# Altium footprint library Connectors.PcbLib: 305 footprints (part 17 of 20)
Each footprint in its own frame and in the unit in brackets; x right, y up, seen from the top. Pads: shape width x height; smd on the part's side, far side on the other; paste and mask are expansions set on the pad; w line width, h text height; cw(c..) or ccw(c..) is an arc to the next point about the centre after c.
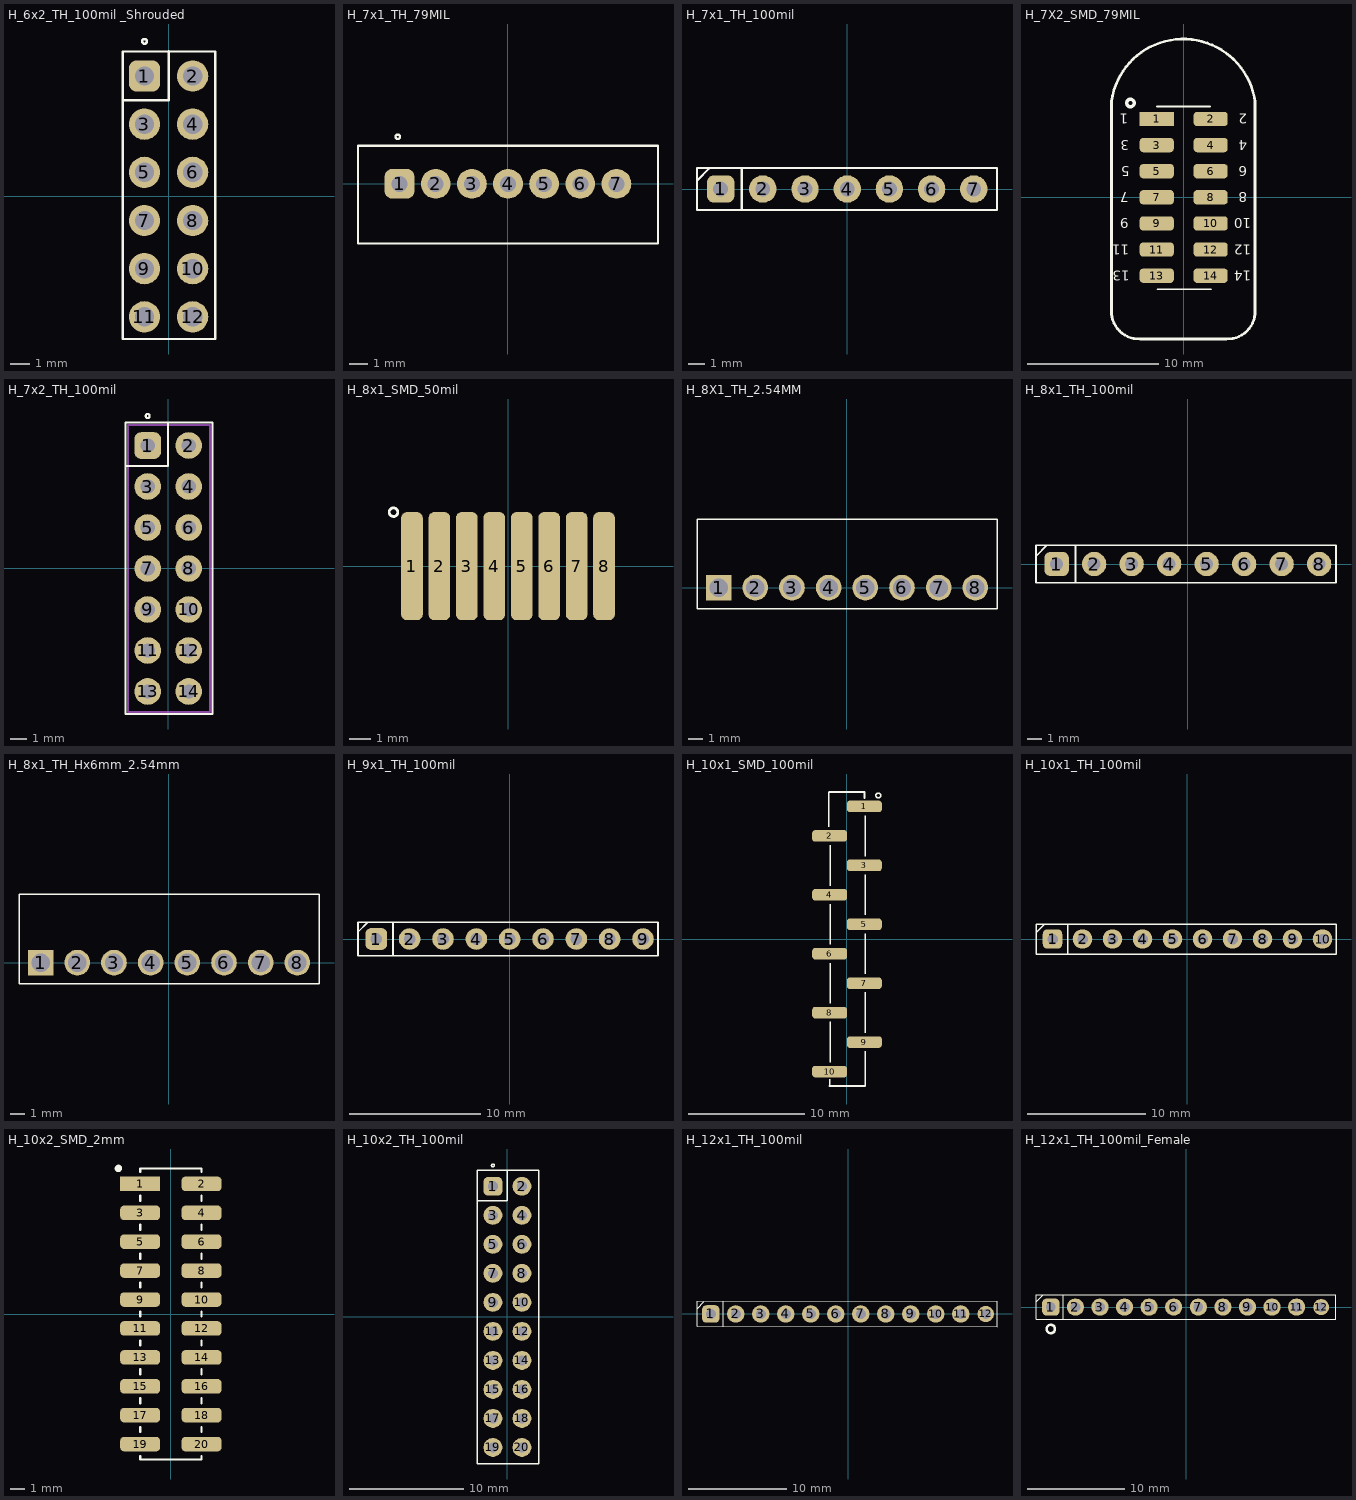
[diagram p16: the footprints below, top view; thin cyan lines are the x and y axes]

## H_6x2_TH_100mil _Shrouded [mil] "/ 20221122 / J.Jaramillo"
pads (12):
  rrect50% 65x65 hole 40: 1(-50,250)
  round 65 hole 40: 2(50,250) 3(-50,150) 4(50,150) 5(-50,50) 6(50,50) 7(-50,-50) 8(50,-50) 9(-50,-150) 10(50,-150) 11(-50,-250) 12(50,-250)
Top Overlay:
  circle w5: c-50,322 r4.92
  lines w5: -95.19,200 0,200 0,301.5 ; -95.19,-296 97,-296 97,301 -95.19,301 -95.19,-296
3D body "connector 12pin.stp": height 362.72, standoff -117.6, extent -60.7,-450.79 472.44,450.79

## H_7x1_TH_79MIL [mil] "/20220804/J-E.Pachon"
pads (7):
  rrect50% 65x65 hole 35: 1(-236.22,0)
  round 65 hole 35: 2(-157.48,0) 3(-78.74,0) 4(0,0) 5(78.74,0) 6(157.48,0) 7(236.22,0)
Top Overlay:
  circle w5: c-240.16,102.36 r4.92
  lines w5: -326.77,-129.92 -326.77,82.68 326.77,82.68 326.77,-129.92 -326.77,-129.92
3D body "62000711622.stp": height 238.19, standoff -135.83, extent -315.51,-116.13 314.41,68.9

## H_7x1_TH_100mil [mil] "/ 20190829 / M-X.Arias"
pads (7):
  rrect50% 65x65 hole 35: 1(-300,0)
  round 65 hole 35: 2(-200,0) 3(-100,0) 4(0,0) 5(100,0) 6(200,0) 7(300,0)
Top Overlay:
  lines w5: -356,19.68 -326.87,48.82 ; -250,-50 -250,50 ; -356,-50 355,-50 355,50 -356,50 -356,-50

## H_7X2_SMD_79MIL [mm] "/20200724/N-A.Potosi"
pads (14):
  rect 2.613x1.1 smd: 1(-2.063,6)
  rrect50% 2.613x1.1 smd: 2(2.063,6) 3(-2.063,4) 4(2.063,4) 5(-2.063,2) 6(2.063,2) 7(-2.063,0) 8(2.063,0) 9(-2.063,-2) 10(2.063,-2) 11(-2.063,-4) 12(2.063,-4) 13(-2.063,-6) 14(2.063,-6)
Top Overlay:
  circle w0.254: c-4.08,7.219 r0.29
  lines w0.127: -2.076,6.952 2.014,6.957 ; -2.003,-7.05 2.087,-7.045
  lines w0.203: -5.524,-8.928 ccw(c-3.425,-8.74) -3.337,-10.845 ; -5.523,-8.95 -5.523,7.4 cw(c-0.039,6.574) 5.457,7.321 ; -3.337,-10.842 3.272,-10.845 ccw(c3.36,-8.74) 5.459,-8.928 ; 5.457,-8.928 5.457,7.4
  text "1" at -4.258,6.381 h0.76
  text "3" at -4.16,4.381 h0.76
  text "2" at 4.856,6.381 h0.76
  text "4" at 4.856,4.381 h0.76
  text "6" at 4.856,2.381 h0.76
  text "8" at 4.856,0.381 h0.76
  text "10" at 5.173,-1.619 h0.76
  text "12" at 5.173,-3.619 h0.76
  text "14" at 5.173,-5.619 h0.76
  text "13" at -4.129,-5.619 h0.76
  text "11" at -4.154,-3.619 h0.76
  text "9" at -4.218,-1.619 h0.76
  text "7" at -4.195,0.381 h0.76
  text "5" at -4.135,2.381 h0.76
3D body "57202g5207lf.stp": height 6.52, standoff 0.02, extent -3.033,-7.045 2.972,6.955

## H_7x2_TH_100mil [mil] "/ 20190614 / J-P.Vargas.A"
pads (14):
  rrect50% 65x65 hole 35: 1(-50,300)
  round 65 hole 35: 2(50,300) 3(-50,200) 4(50,200) 5(-50,100) 6(50,100) 7(-50,0) 8(50,0) 9(-50,-100) 10(50,-100) 11(-50,-200) 12(50,-200) 13(-50,-300) 14(50,-300)
Top Overlay:
  circle w5: c-50,372 r4.92
  lines w5: -104,250 0,250 0,356 ; -104,-355 108,-355 108,356 -104,356 -104,-355
Mechanical 1:
  lines w3.94: -98,-350 102,-350 102,350 -98,350 -98,-350
3D body "m20-9980745_asm.stp": height 340.16, standoff -119.69, extent -98.32,-350 101.68,350

## H_8x1_SMD_50mil [mm] "/ 20190916/ N A potosi"
pads (8):
  rrect50% 1x5 smd: 1(-4.445,0) 2(-3.175,0) 3(-1.905,0) 4(-0.635,0) 5(0.635,0) 6(1.905,0) 7(3.175,0) 8(4.445,0)
Top Overlay:
  circle w0.127: c-5.3,2.5 r0.2

## H_8X1_TH_2.54MM [mil] "/20221011/J-E.Pachon"
pads (8):
  rect 70x70 hole 50: 1(-350,0)
  round 70 hole 50: 2(-250,0) 3(-150,0) 4(-50,0) 5(50,0) 6(150,0) 7(250,0) 8(350,0)
Top Overlay:
  lines w3.94: -408.97,-58.27 -408.97,187.01 409.06,187.01 409.06,-58.27 -408.97,-58.27
3D body "022288083.stp": height 98.5, standoff -134.5, extent -399.63,-9.24 400.37,487.75

## H_8x1_TH_100mil [mil] "/ 20190823 / C-D Viveros"
pads (8):
  rrect50% 65x65 hole 35: 1(-350,0)
  round 65 hole 35: 2(-250,0) 3(-150,0) 4(-50,0) 5(50,0) 6(150,0) 7(250,0) 8(350,0)
Top Overlay:
  lines w5: -405,20.87 -375.87,50 ; -300,-50 -300,50 ; -405,-50 395,-50 395,50 -405,50 -405,-50

## H_8x1_TH_Hx6mm_2.54mm [mil] "/20221128/J-A.Sepulveda"
pads (8):
  rect 70x70 hole 50: 1(-350,0)
  round 70 hole 50: 2(-250,0) 3(-150,0) 4(-50,0) 5(50,0) 6(150,0) 7(250,0) 8(350,0)
Top Overlay:
  lines w3.94: -408.97,-58.27 -408.97,187.01 409.06,187.01 409.06,-58.27 -408.97,-58.27
3D body "61300811021_Downloads_STP_61300811021_rev1.stp": height 100.5, standoff -117.61, extent -399.63,-9.24 400.37,398.63

## H_9x1_TH_100mil [mil] "/ 20190919 / C-D Viveros"
pads (9):
  rrect50% 65x65 hole 35: 1(-400,0)
  round 65 hole 35: 2(-300,0) 3(-200,0) 4(-100,0) 5(0,0) 6(100,0) 7(200,0) 8(300,0) 9(400,0)
Top Overlay:
  lines w5: -455,20.87 -425.87,50 ; -350,-50 -350,50 ; -455,-50 445,-50 445,50 -455,50 -455,-50

## H_10x1_SMD_100mil [mm] "/ 20210811 / V-A.Patino"
pads (10):
  rrect50% 3x1 smd: 1(1.5,11.43) 2(-1.5,8.89) 3(1.5,6.35) 4(-1.5,3.81) 5(1.5,1.27) 6(-1.5,-1.27) 7(1.5,-3.81) 8(-1.5,-6.35) 9(1.5,-8.89) 10(-1.5,-11.43)
Top Overlay:
  circle w0.127: c2.692,12.37 r0.209
  lines w0.127: -1.552,9.69 -1.552,12.675 ; -1.5,-12.675 -1.5,-12.09 ; -1.448,-10.63 -1.448,-7.15 ; -1.448,-5.55 -1.448,-2.07 ; -1.448,-0.47 -1.448,3.01 ; -1.448,4.61 -1.448,8.09 ; 1.527,-12.675 1.552,-12.649 1.552,-9.69 ; 1.552,-8.09 1.552,-4.61 ; 1.552,-3.01 1.552,0.47 ; 1.552,2.07 1.552,5.55 ; 1.552,7.15 1.552,10.63
  lines w0.152: -1.527,12.675 1.5,12.675 1.5,12.141 ; -1.5,-12.675 1.527,-12.675
3D body "s10129380-910002XLF.stp": height 11.9, standoff 0.01, extent -2.475,-12.7 2.323,12.7

## H_10x1_TH_100mil [mil] "/ 20190911 / C-D Viveros"
pads (10):
  rrect50% 65x65 hole 35: 1(-450,0)
  round 65 hole 35: 2(-350,0) 3(-250,0) 4(-150,0) 5(-50,0) 6(50,0) 7(150,0) 8(250,0) 9(350,0) 10(450,0)
Top Overlay:
  lines w5: -505,20.87 -475.87,50 ; -400,-50 -400,50 ; 494.49,50 -505,50 -505,-50 495,-50 495,50

## H_10x2_SMD_2mm [mm] "/20230119/J-A.Sepulveda"
pads (20):
  rect 2.75x1 smd: 1(-2.125,9)
  rrect50% 2.75x1 smd: 2(2.125,9) 3(-2.125,7) 4(2.125,7) 5(-2.125,5) 6(2.125,5) 7(-2.125,3) 8(2.125,3) 9(-2.125,1) 10(2.125,1) 11(-2.125,-1) 12(2.125,-1) 13(-2.125,-3) 14(2.125,-3) 15(-2.125,-5) 16(2.125,-5) 17(-2.125,-7) 18(2.125,-7) 19(-2.125,-9) 20(2.125,-9)
Top Overlay:
  circle w0.254: c-3.627,10.071 r0.127
  lines w0.152: -2.121,-9.828 -2.121,-10.071 2.121,-10.071 2.121,-9.828 ; -2.121,-8.172 -2.121,-7.828 ; -2.121,-6.172 -2.121,-5.828 ; -2.121,-4.172 -2.121,-3.828 ; -2.121,-2.172 -2.121,-1.828 ; -2.121,-0.172 -2.121,0.172 ; -2.121,1.828 -2.121,2.172 ; -2.121,3.828 -2.121,4.172 ; -2.121,5.828 -2.121,6.172 ; -2.121,7.828 -2.121,8.172 ; -2.121,9.828 -2.121,10.071 2.121,10.071 2.121,9.828 ; 2.121,-8.172 2.121,-7.828 ; 2.121,-6.172 2.121,-5.828 ; 2.121,-4.172 2.121,-3.828 ; 2.121,-2.172 2.121,-1.828 ; 2.121,-0.172 2.121,0.172 ; 2.121,1.828 2.121,2.172 ; 2.121,3.828 2.121,4.172 ; 2.121,5.828 2.121,6.172 ; 2.121,7.828 2.121,8.172
Bottom Overlay:
  circle w0.254: c-3.627,10.071 r0.127
3D body "877592074.stp": height 6.51, standoff 0.01, extent -2.75,-9.95 2.75,9.95

## H_10x2_TH_100mil [mil] "/ 20190625 / J-P.Vargas.A"
pads (20):
  rrect50% 65x65 hole 35: 1(-50,450)
  round 65 hole 35: 2(50,450) 3(-50,350) 4(50,350) 5(-50,250) 6(50,250) 7(-50,150) 8(50,150) 9(-50,50) 10(50,50) 11(-50,-50) 12(50,-50) 13(-50,-150) 14(50,-150) 15(-50,-250) 16(50,-250) 17(-50,-350) 18(50,-350) 19(-50,-450) 20(50,-450)
Top Overlay:
  circle w5: c-50,522 r4.92
  lines w5: -104,400 0,400 0,506 ; -104,-507 -104,506 108,506 108,-507 -104,-507
3D body "HDR 20 pin.STEP": height 330, standoff -100, extent -99,-499 101,501

## H_12x1_TH_100mil [mil] "/ 20210906/ V-A.Patino"
pads (12):
  rrect50% 70x70 hole 40: 1(-550,0)
  round 70 hole 40: 2(-450,0) 3(-350,0) 4(-250,0) 5(-150,0) 6(-50,0) 7(50,0) 8(150,0) 9(250,0) 10(350,0) 11(450,0)
  round 65 hole 40: 12(550,0)
Top Overlay:
  lines w5: -605,20.87 -575.87,50 ; -500,-50 -500,50 ; -605,-50 -605,50 595,50 595,-50 -605,-50
3D body "PRPC012SAAN-RC.STEP": height 300.5, standoff -119.58, extent -602.5,-52.5 597.5,47.5

## H_12x1_TH_100mil_Female [mil] "/ 20210906/ V-A.Patino"
pads (12):
  rrect50% 70x70 hole 40: 1(-550,0)
  round 70 hole 40: 2(-450,0) 3(-350,0) 4(-250,0) 5(-150,0) 6(-50,0) 7(50,0) 8(150,0) 9(250,0) 10(350,0) 11(450,0)
  round 65 hole 40: 12(550,0)
Top Overlay:
  circle w10: c-550,-89 r17.03
  lines w5: -610,20.87 -580.87,50 ; -500,-50 -500,50 ; -610.24,-50 -610.24,50 610.24,50 610.24,-50 -610.24,-50
3D body "SSW-112-02-T-S.stp": height 335.5, standoff -193.5, extent -610,-47.5 610,47.5